# Altium footprint library PcbLib1_2023.PcbLib: 35 footprints (part 2 of 3)
Each footprint in its own frame and in the unit in brackets; x right, y up, seen from the top. Pads: shape width x height; smd on the part's side, far side on the other; paste and mask are expansions set on the pad; w line width, h text height; cw(c..) or ccw(c..) is an arc to the next point about the centre after c.
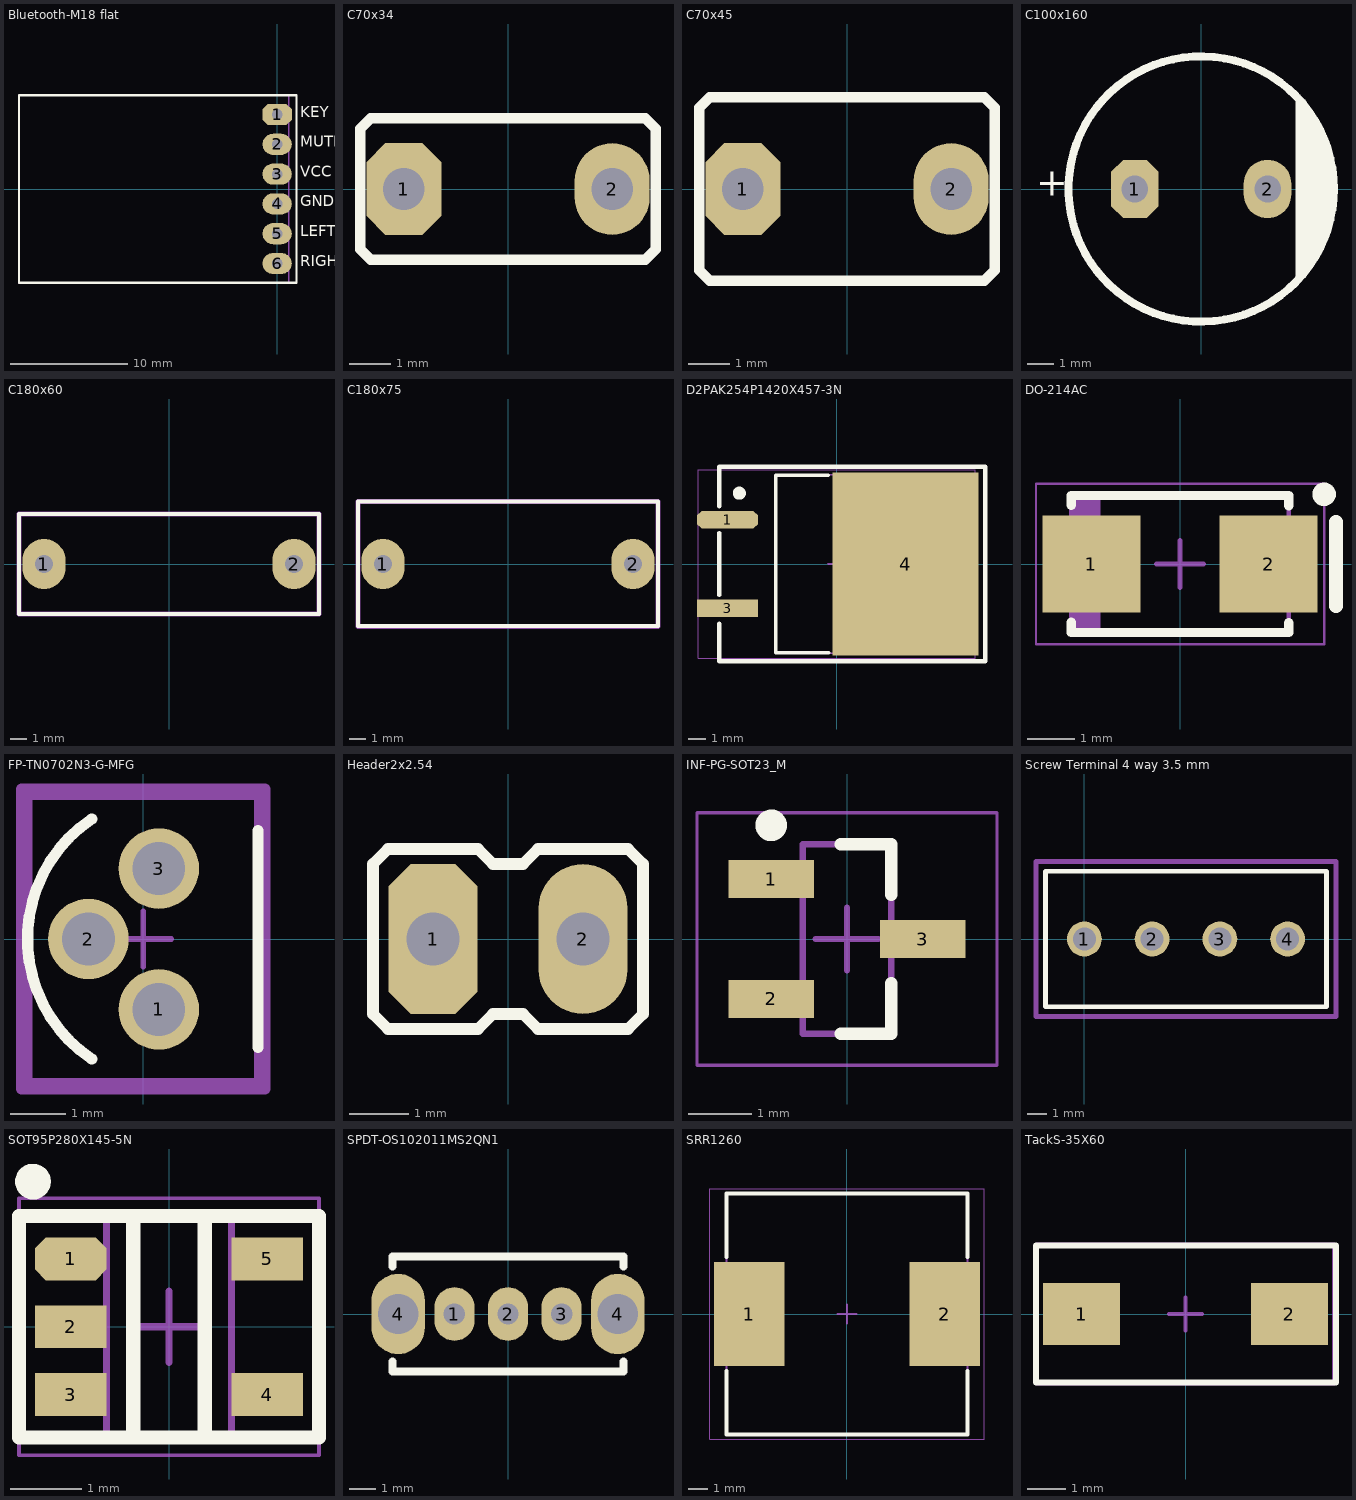
[diagram p1: the footprints below, top view; thin cyan lines are the x and y axes]

## Bluetooth-M18 flat [mm]
height 6
pads (6):
  oct 2.5x1.8 hole 0.9: 1(0,6.35)
  oval 2.5x1.8 hole 0.9: 2(0,3.81) 3(0,1.27) 4(0,-1.27) 5(0,-3.81) 6(0,-6.35)
Top Overlay:
  lines w0.2: -22,-8 -22,8.001 1.397,8.001 1.651,8.001 1.651,-8 -22,-8
  text "RIGHT" at 1.969,-6.909 h1.6
  text "LEFT" at 1.969,-4.371 h1.6
  text "GND" at 1.969,-1.829 h1.6
  text "VCC" at 1.969,0.712 h1.6
  text "MUTE" at 1.969,3.258 h1.6
  text "KEY" at 1.969,5.789 h1.6
Mechanical 15:
  lines w0.152: -22,-8 -22,8 1,8 1,-8 -22,-8

## C70x34 [mm] "pitch-5mm"
height 8
pads (2):
  oct 1.8x2.2 hole 1: 1(-2.5,0)
  oval 1.8x2.2 hole 1: 2(2.5,0)
Top Overlay:
  lines w0.254: -3.55,-1.446 -3.296,-1.7 3.296,-1.7 3.55,-1.446 3.55,1.446 3.296,1.7 -3.296,1.7 -3.55,1.446 -3.55,-1.446
3D body: height 8, standoff 0, extent -3.683,-1.778 3.683,1.7
3D body: height 0, standoff -5, extent -2.9,-0.4 -2.1,0.4
3D body: height 0, standoff -5, extent 2.1,-0.4 2.9,0.4

## C70x45 [mm] "pitch:5mm"
height 9.5
pads (2):
  oct 1.8x2.2 hole 1: 1(-2.5,0)
  oval 1.8x2.2 hole 1: 2(2.5,0)
Top Overlay:
  lines w0.254: -3.55,-1.946 -3.296,-2.2 3.296,-2.2 3.55,-1.946 3.55,1.946 3.296,2.2 -3.296,2.2 -3.55,1.946 -3.55,-1.946
3D body: height 0, standoff -5, extent 2.1,-0.4 2.9,0.4
3D body: height 0, standoff -5, extent -2.9,-0.4 -2.1,0.4
3D body: height 9.5, standoff 0, extent -3.683,-2.2 3.683,2.2

## C100x160 [mm] "10mmx16mm-pitch5mm"
height 16
pads (2):
  oct 1.8x2.2 hole 1: 1(-2.5,0)
  oval 1.8x2.2 hole 1: 2(2.5,0)
Top Overlay:
  circle w0.3: c0,0 r5
  region: 5.079,0.821 4.198,2.89 3.556,3.354 3.556,-3.403 4.047,-3.114 4.863,-1.432
  lines w0.3: 3.62,3.449 3.81,3.259 3.81,3.238 ; 3.649,-3.403 3.81,-3.242 ; 4.583,1.986 4.589,1.986
  text "+" at -6.223,-0.611 h1.8
3D body "User Library-Cap electro 10x16x5_0mm.step": height 16.53, standoff -3.74, extent -5.025,-5.025 5.025,5.025

## C180x60 [mm] "spacing 15mm"
height 12
pads (2):
  oval 2.6x3 hole 1.1: 1(-7.5,0) 2(7.5,0)
Top Overlay:
  lines w0.254: -9,-3 9,-3 9,3 -9,3 -9,-3
Mechanical 15:
  lines w0.3: -9,-3 9,-3 9,3 -9,3 -9,-3
3D body: height 12, standoff 0, extent -9,-3 9,3
3D body: height 0, standoff -5, extent -7.9,-0.4 -7.1,0.4
3D body: height 0, standoff -5, extent 7.1,-0.4 7.9,0.4

## C180x75 [mm] "spacing 15mm"
height 12
pads (2):
  oval 2.6x3 hole 1.1: 1(-7.5,0) 2(7.5,0)
Top Overlay:
  lines w0.254: -9,-3.712 -9,3.75 9,3.75 9,-3.712 -9,-3.712
Mechanical 15:
  lines w0.3: -9,-3.75 9,-3.75 9,3.75 -9,3.75 -9,-3.75
3D body: height 12, standoff 0, extent -9,-3.75 9,3.75
3D body: height 0, standoff -5, extent -7.9,-0.4 -7.1,0.4
3D body: height 0, standoff -5, extent 7.1,-0.4 7.9,0.4

## D2PAK254P1420X457-3N [mm] "D2-PAK, 3-Pads, Body 7,78x8,48mm (max), IPC Medium Density"
height 4.57
pads (3):
  oct 3.5x1.016 smd: 1(-6.265,2.54)
  rect 3.5x1.016 smd: 3(-6.265,-2.54)
  rect 8.38x10.49 smd: 4(3.95,0)
Top Overlay:
  circle w0.5: c-5.588,4.064 r0.125
  lines w0.2: -0.49,5.1 -3.5,5.1 -3.5,-5.1 -0.464,-5.1
  lines w0.254: -6.731,-3.429 -6.731,-5.588 8.509,-5.588 8.509,5.588 -6.731,5.588 -6.731,3.302 ; -6.731,-1.778 -6.731,1.778
Mechanical 13:
  lines w0.1: -3.5,-5.125 -3.5,5.125 5.85,5.125 5.85,-5.125 -3.5,-5.125
Mechanical 15:
  lines w0.05: -7.95,-5.4 -7.95,5.4 7.95,5.4 7.95,-5.4 -7.95,-5.4
  lines w0.1: -0.5,0 0.5,0 ; 0,-0.5 0,0.5
3D body "DPAK254P1420X457-3N.step": height 5.03, standoff 0, extent -6.714,-5.125 7.485,5.125

## DO-214AC [mm] "Molded Diode, 2-Leads, Body 4,30x2,70mm, IPC Medium Density"
height 2.44
pads (2):
  rect 2.07x2.06 smd: 1(-1.875,0) 2(1.875,0)
Top Overlay:
  circle w0.25: c3.05,1.475 r0.125
  lines w0.2: -2.3,-1.235 -2.3,-1.45 2.3,-1.45 2.3,-1.239 ; -2.3,1.241 -2.3,1.45 2.3,1.45 2.3,1.237
  lines w0.3: 3.302,-0.889 3.302,0.889
Mechanical 13:
  rectangle: -2.3,-1.45 -1.681,1.45
  lines w0.1: -2.3,-1.45 2.3,-1.45 2.3,1.45 -2.3,1.45 -2.3,-1.45
Mechanical 15:
  lines w0.05: -3.05,-1.7 3.05,-1.7 3.05,1.7 -3.05,1.7 -3.05,-1.7
  lines w0.1: -0.5,0 0.5,0 ; 0,-0.5 0,0.5
3D body "DIOM4327X24N.step": height 2.44, standoff 0, extent -2.52,-1.45 2.52,1.45

## FP-TN0702N3-G-MFG [mm]
pads (3):
  round 1.45 hole 0.95 paste-2539.97 mask+0: 1(0.279,-1.27) 2(-0.991,0) 3(0.279,1.27)
Top Overlay:
  lines w0.2: -0.931,-2.165 cw(c0.516,0) -0.931,2.165 ; 2.063,-1.953 2.063,1.953
Top 3D Body:
  lines w0.2: -2.095,-2.603 2.095,-2.603 2.095,2.603 -2.095,2.603 -2.095,-2.603
Top Courtyard:
  lines w0.2: -2.195,-2.703 2.195,-2.703 2.195,2.703 -2.195,2.703 -2.195,-2.703
Top Assembly:
  lines w0.2: -2.195,-2.703 2.195,-2.703 2.195,2.703 -2.195,2.703 -2.195,-2.703
  text ".Designator" at 0,-0.001 h1
Top Component Center:
  lines w0.1: -0.5,0 0.5,0 ; 0,-0.5 0,0.5
3D body "Trans_Microchip_TN0702N3-G_eec.STEP": height 0.25, standoff 0, extent -2.195,-2.703 2.195,2.703

## Header2x2.54 [mm] "pitch 2.54mm"
height 5
pads (2):
  oct 1.5x2.54 hole 0.9: 1(-1.27,0)
  oval 1.5x2.54 hole 0.9: 2(1.27,0)
Top Overlay:
  lines w0.2: -2.286,-1.27 -2.032,-1.524 -0.508,-1.524 -0.254,-1.27 0.254,-1.27 0.508,-1.524 2.032,-1.524 2.286,-1.27 2.286,1.27 2.032,1.524 0.508,1.524 0.254,1.27 -0.254,1.27 -0.508,1.524 -1.524,1.524 -2.032,1.524 -2.286,1.27 -2.286,-1.27
3D body "header-2.54mm-2.step": height 7.95, standoff -3.05, extent -2.54,-1.27 2.54,1.27

## INF-PG-SOT23_M [mm] "SOT23, 3-Leads, Body 2.9x1.3mm, Pitch 0.95mm, IPC Low Density"
height 1.1
pads (3):
  rect 1.35x0.6 smd: 1(-1.2,0.95) 2(-1.2,-0.95) 3(1.2,0)
Top Overlay:
  circle w0.25: c-1.2,1.8 r0.125
  lines w0.2: -0.1,-1.5 0.7,-1.5 0.7,-0.7 ; -0.1,1.5 0.7,1.5 0.7,0.7
Mechanical 13:
  lines w0.1: -0.7,-1.5 -0.7,1.5 0.7,1.5 0.7,-1.5 -0.7,-1.5
Mechanical 15:
  lines w0.05: -2.375,-2 -2.375,2 2.375,2 2.375,-2 -2.375,-2
  lines w0.1: -0.5,0 0.5,0 ; 0,-0.5 0,0.5
3D body: height 1.1, standoff 0.1, extent -0.7,-1.5 0.7,1.5

## Screw Terminal 4 way 3.5 mm [mm] "Screw Terminal 4 way 3.5 mm Pitch MOLEX 39357 Series"
pads (4):
  round 1.8 hole 1.2: 1(0,0) 2(3.5,0) 3(7,0) 4(10.5,0)
Top Overlay:
  lines w0.254: -2,-3.5 -2,3.5 12.5,3.5 12.5,-3 12.5,-3.5 -2,-3.5
  text "." at -1.246,-1.246 h0.5
Top Assembly:
  lines w0.254: -2.5,-4 -2.5,4 13,4 13,-4 -2.5,-4
3D body "393570004.stp": height 8.51, standoff -3.51, extent -1.97,-3.645 12,3.645

## SOT95P280X145-5N [mm] "SOT23, 5-Leads, Body 2,90x2,80mm, Pitch 0,95mm, IPC Medium Density"
height 1.45
pads (5):
  oct 1x0.6 smd: 1(-1.375,0.95)
  rect 1x0.6 smd: 2(-1.375,0) 3(-1.375,-0.95) 4(1.375,-0.95) 5(1.375,0.95)
Top Overlay:
  circle w0.25: c-1.905,2.032 r0.125
  lines w0.2: -0.5,-1.525 -0.5,1.525 ; 0.5,-1.525 0.5,1.55 ; 0.597,1.55 0.601,1.55 ; -2.1,-1.55 2.1,-1.55 2.1,1.55 -2.1,1.55 -2.1,-1.55
Mechanical 13:
  lines w0.1: -0.875,-1.525 -0.875,1.525 0.875,1.525 0.875,-1.525 -0.875,-1.525
Mechanical 15:
  lines w0.05: -2.1,-1.8 -2.1,1.8 2.1,1.8 2.1,-1.8 -2.1,-1.8
  lines w0.1: -0.5,0 0.5,0 ; 0,-0.5 0,0.5
3D body "SOT95P280X145-5N.step": height 1.45, standoff 0, extent -1.5,-1.525 1.5,1.525

## SPDT-OS102011MS2QN1 [mm]
height 4
pads (5):
  oval 1.5x2 hole 0.8: 1(-2,0) 2(0,0) 3(2,0)
  oval 2x3 hole 1.5: 4(-4.1,0) 4(4.1,0)
Top Overlay:
  lines w0.3: -4.318,-1.778 -4.318,-2.15 4.3,-2.15 4.318,-2.15 4.318,-1.778 ; -4.318,1.778 -4.318,2.15 -4.3,2.15 4.3,2.15 4.318,2.15 4.318,1.778
3D body "User Library-OS102011MS2QN1.step": height 8, standoff -3.41, extent -4.3,-2.15 4.3,2.15

## SRR1260 [mm] "Precision Wire Wound Inductor, 2-Leads, Body 12,50x12,50mm, IPC Medium Density"
height 6
pads (2):
  rect 3.65x5.4 smd: 1(-5.075,0) 2(5.075,0)
Top Overlay:
  lines w0.2: -6.25,-2.95 -6.25,-6.25 6.25,-6.25 6.25,-2.95 ; -6.25,2.95 -6.25,6.25 6.25,6.25 6.25,2.95
Top Courtyard:
  lines w0.05: -7.125,-6.5 -7.125,6.5 7.125,6.5 7.125,-6.5 -7.125,-6.5
  lines w0.1: -0.5,0 0.5,0 ; 0,-0.5 0,0.5
Top Assembly:
  lines w0.1: -6.25,-6.25 -6.25,6.25 6.25,6.25 6.25,-6.25 -6.25,-6.25
3D body "INDP125125X60N.step": height 6.1, standoff 0, extent -6.35,-6.25 6.35,6.25

## TackS-35X60 [mm] "tack switch 3.5mmx6mm"
height 5
pads (2):
  rect 2x1.6 smd: 1(-2.7,0) 2(2.7,0)
Top Overlay:
  lines w0.15: -3.886,-1.778 3.912,-1.778 3.912,1.778 -3.886,1.778 -3.886,-1.778
Mechanical 13:
  lines w0.1: -3.861,-1.803 -3.861,1.803 3.861,1.803 3.861,-1.803 -3.861,-1.803
Mechanical 15:
  lines w0.05: -3.835,-1.778 -3.835,1.778 3.835,1.778 3.835,-1.778 -3.835,-1.778
  lines w0.1: -0.425,0 0.425,0 ; 0,-0.425 0,0.425
3D body "User Library-DTSM-32.STEP": height 5, standoff 0, extent -3.6,-1.75 3.6,1.75